# EAGLE library part PCB_pads_only (library astra)
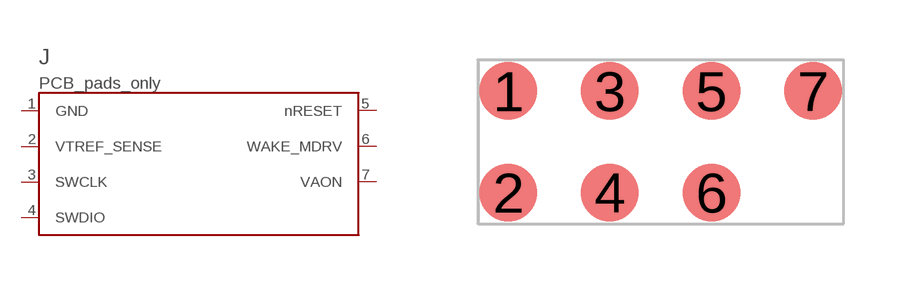
[diagram p8: symbol with the pads of SWD_FIXTURE_7; footprint SWD_FIXTURE_7]

Designator prefix J

## PCB_pads_only  [SWD_FIXTURE_7]
1  GND  pas
2  VTREF_SENSE  pas
3  SWCLK  pas
4  SWDIO  pas
5  nRESET  pas
6  WAKE_MDRV  pas
7  VAON  pas

## Footprint SWD_FIXTURE_7 (pad centres in mm)
Carrier-specific pogo pattern, pin 8 missing. The connector body belongs to the fixture.
smd 1.45 x 1.45: 1 -3.81,1.27; 2 -3.81,-1.27; 3 -1.27,1.27; 4 -1.27,-1.27; 5 1.27,1.27; 6 1.27,-1.27; 7 3.81,1.27